# Altium integrated library Karta Radiowa.IntLib: 43 symbols (part 1 of 2)
Pins are listed as number, name and electrical type; pins without a type are passive.

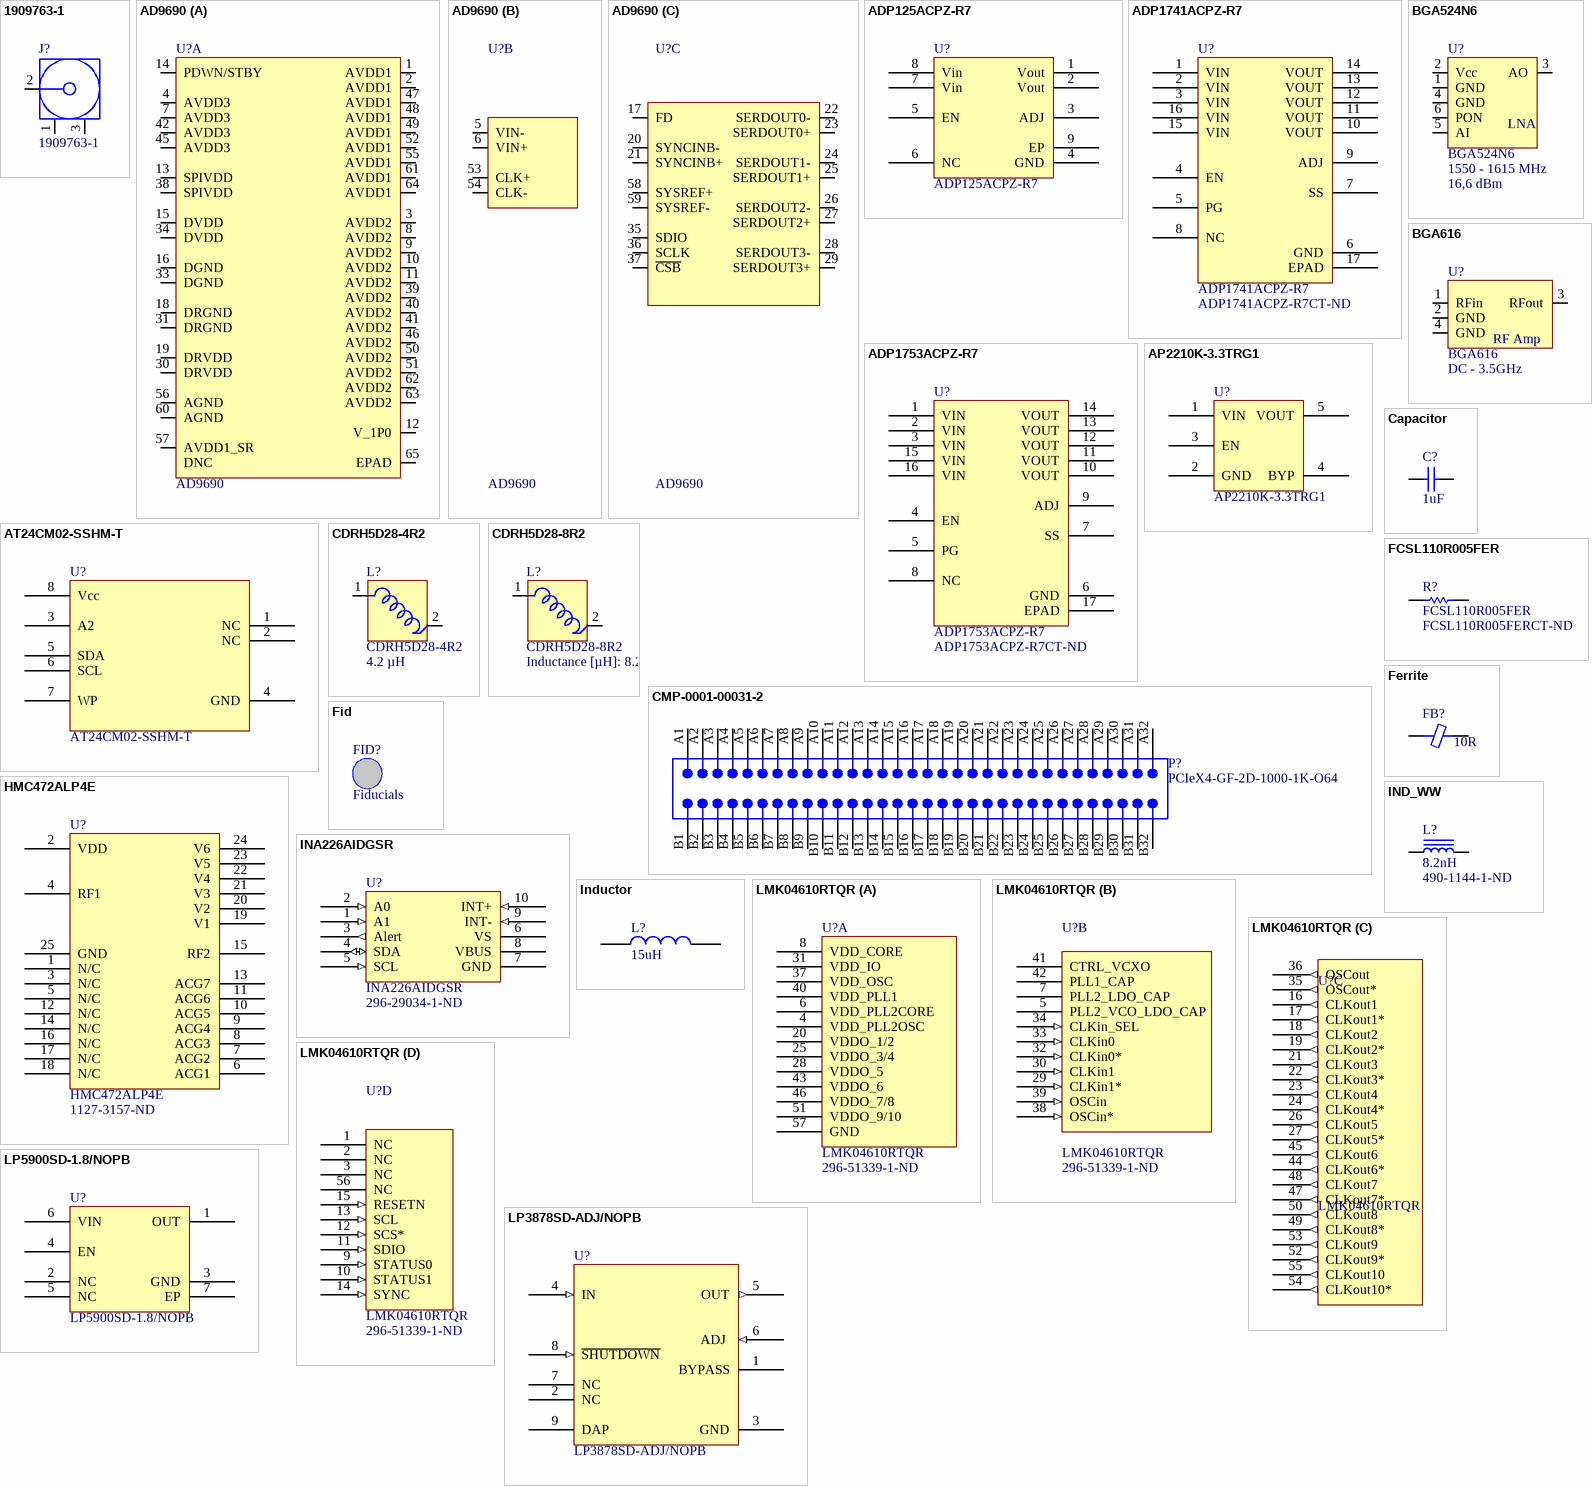
[diagram p0: symbols 1909763-1 to LP5900SD-1.8/NOPB]

## 1909763-1
designator J?
Ultra Miniature Coaxial Connector Jack, 60 V, 50 Ohm, -40 to 90 degC, RoHS, Tape and Reel; Brand: TE Connectivity / AMP; Maximum Frequency: 6 GHz; Gender: Jack (Female); Body Material: Liquid Crystal Polymer (LCP); RF Series: UMCC; Impedance: 50 Ohms; DatasheetVersion: Rev. B2; PackageReference: SMD; PackageDescription: 3-Pin Surface Mount Device, Body 2.6 x 2.6 mm; Supplier 1: Newark; Supplier Part Number 1: 62X0488; Supplier 2: Farnell; Supplier Part Number 2: 2781689; Supplier 3: Digi-Key; Supplier Part Number 3: A118077TR-ND; Supplier 4: Digi-Key; Supplier Part Number 4: A118077CT-ND; Supplier 5: Digi-Key; Supplier Part Number 5: A118077DKR-ND; Product Category: RF Connectors / Coaxial Connectors; Packaging: Reel; Product: Connectors; Orientation: Straight; Operating Temperature Range: - 40 C to + 90 C; Factory Pack Quantity: 5000; RoHS: Details; Contact Plating: Gold; Contact Material: Copper Alloy; Mounting Technology: Surface Mount; ComponentLink1Description: Manufacturer URL; ComponentLink1URL: http://www.te.com; ComponentLink2Description: Datasheet; ComponentLink2URL: http://www.te.com/commerce/DocumentDelivery/DDEController?Action=srchrtrv&DocNm=1909763&DocType=Customer+Drawing&DocLang=English
footprint TECO-1909763-1_V (SMD, 3-Leads, Body 2.6x2.6mm, Height 1.25mm)
pins: 1, 2, 3

## AD9690
designator U?
Manufacturer: Analog Devices; Manufacturer Part Number: AD9690BCPZ-500; Number of Bits: 14; Sampling Rate: 500MS/s; Number of Inputs: 1; Min Supply Voltage: 3.2V; Max Supply Voltage: 3.4V; Interface: Serial; Resolution: 14b; Supply Type: Single; Differential Nonlinearity: 0.5LSB; Integral Nonlinearity (INL): 2.5LSB; Power Dissipation: 1.5W; Supplier 1: Digi-Key; Supplier Part Number 1: AD9690BCPZ-500-ND; Stock 1: 6; Pricing 1: 1 = 199,64000, 10 = 191,20500, 25 = 186,98720 (USD); RoHS: Yes; Mount: Surface Mount; Number of Pins: 64; Min Operating Temperature: -40°C; Max Operating Temperature: 85°C; Packaging: Tray; Number of A/D Converters: 1; REACH SVHC: No SVHC; Lead Free: Lead Free; ComponentLink1URL: http://www.mouser.com/ds/2/609/AD9690-534148.pdf?src-supplier=Mouser; ComponentLink1Description: http://www.mouser.com/ds/2/609/AD9690-534148.pdf?src-supplier=Mouser; ComponentLink2URL: http://www.analog.com/media/en/technical-documentation/data-sheets/AD9690.pdf?src-supplier=Digi-Key; ComponentLink2Description: http://www.analog.com/media/en/technical-documentation/data-sheets/AD9690.pdf?src-supplier=Digi-Key; ComponentLink3URL: http://www.farnell.com/datasheets/2146909.pdf?src-supplier=Element14; ComponentLink3Description: http://www.farnell.com/datasheets/2146909.pdf?src-supplier=Element14; ComponentLink4URL: http://www.analog.com/media/en/technical-documentation/data-sheets/AD9690.pdf?src-supplier=Avnet; ComponentLink4Description: http://www.analog.com/media/en/technical-documentation/data-sheets/AD9690.pdf?src-supplier=Avnet
footprint AD9690 (AD9690 9 x 9mm, 64 pin, 0.5 pitch 7.6sq Pad)
part A pins: 1 AVDD1, 2 AVDD1, 3 AVDD2, 4 AVDD3, 7 AVDD3, 8 AVDD2, 9 AVDD2, 10 AVDD2, 11 AVDD2, 12 V_1P0, 13 SPIVDD, 14 PDWN/STBY, 15 DVDD, 16 DGND, 18 DRGND, 19 DRVDD, 30 DRVDD, 31 DRGND, 33 DGND, 34 DVDD, 38 SPIVDD, 39 AVDD2, 40 AVDD2, 41 AVDD2, 42 AVDD3, 44, 43, 32 DNC, 45 AVDD3, 46 AVDD2, 47 AVDD1, 48 AVDD1, 49 AVDD1, 50 AVDD2, 51 AVDD2, 52 AVDD1, 55 AVDD1, 56 AGND, 57 AVDD1_SR, 60 AGND, 61 AVDD1, 62 AVDD2, 63 AVDD2, 64 AVDD1, 65 EPAD
part B pins: 5 VIN-, 6 VIN+, 53 CLK+, 54 CLK-
part C pins: 17 FD, 20 SYNCINB-, 21 SYNCINB+, 22 SERDOUT0-, 23 SERDOUT0+, 24 SERDOUT1-, 25 SERDOUT1+, 26 SERDOUT2-, 27 SERDOUT2+, 28 SERDOUT3-, 29 SERDOUT3+, 35 SDIO, 36 SCLK, 37 ~{CSB}, 58 SYSREF+, 59 SYSREF-

## ADP125ACPZ-R7
designator U?
IC REG LIN POS ADJ 500MA 8LFCSP; Manufacturer: Analog Devices; Output Voltage: 5V; Number of Outputs: 1; Dropout Voltage: 130mV; Max Input Voltage: 5.5V; Min Input Voltage: 2.3V; Min Current Limit: 550mA; Polarity: Positive; Quiescent Current: 45uA; Reference Voltage: 500mV; Min Output Voltage: 800mV; Accuracy: 1%; Power Supply Rejection Ratio (PSRR): 60dB; Max Supply Current: 210uA; Output Type: Adjustable; Supplier 1: Farnell; Manufacturer Part Number: ADP125ACPZ-R7; Stock 1: 261; RoHS: Yes; Case/Package: MSOP; Number of Pins: 8; Contact Plating: Gold; Min Operating Temperature: -40°C; Max Operating Temperature: 125°C; Output Current: 500mA; Max Output Current: 500mA; Packaging: Tape and Reel; Number of Regulators: 1; Max Output Voltage: 5V; Nominal Supply Current: 45uA; Operating Supply Current: 45uA; Length: 2mm; Height: 0.6mm; Width: 2mm; REACH SVHC: No SVHC; Lead Free: Contains Lead; ComponentLink1URL: https://datasheet.ciiva.com/17365/adp124-125-17365589.pdf?src-supplier=Avnet+Europe; ComponentLink1Description: https://datasheet.ciiva.com/17365/adp124-125-17365589.pdf?src-supplier=Avnet+Europe; ComponentLink2URL: https://datasheet.ciiva.com/2056/adp124-125-2056955.pdf?src-supplier=Digi-Key; ComponentLink2Description: https://datasheet.ciiva.com/2056/adp124-125-2056955.pdf?src-supplier=Digi-Key; ComponentLink3URL: https://datasheet.ciiva.com/2056/adp124-125-2056954.pdf?src-supplier=Digi-Key; ComponentLink3Description: https://datasheet.ciiva.com/2056/adp124-125-2056954.pdf?src-supplier=Digi-Key; ComponentLink4URL: https://datasheet.ciiva.com/2056/adp124-125-2056956.pdf?src-supplier=Digi-Key; ComponentLink4Description: https://datasheet.ciiva.com/2056/adp124-125-2056956.pdf?src-supplier=Digi-Key; ComponentLink5URL: https://datasheet.ciiva.com/48694/001251247-da-01-en-ic-reg-l-adj-adp125acpz-r7-lfcspud-8-adi-48694599.pdf?src-supplier=Conrad; ComponentLink5Description: https://datasheet.ciiva.com/48694/001251247-da-01-en-ic-reg-l-adj-adp125acpz-r7-lfcspud-8-adi-48694599.pdf?src-supplier=Conrad; Supplier Part Number 1: 2457144; Supplier 2: Digi-Key; Manufacturer 2: Analog Devices; Manufacturer Part Number 2: ADP125ACPZ-R7; Stock 2: 12322; Pricing 2: 1=1.39000, 10=1.23900, 25=1.17600, 100=0.96600, 250=0.90300, 500=0.79800, 1000=0.63000 (USD); ComponentLink6URL: http://datasheet.octopart.com/ADP125ACPZ-R7-Analog-Devices-datasheet-11525030.pdf?src-supplier=Newark; ComponentLink6Description: http://datasheet.octopart.com/ADP125ACPZ-R7-Analog-Devices-datasheet-11525030.pdf?src-supplier=Newark; ComponentLink7URL: http://datasheet.octopart.com/ADP125ACPZ-R7-Analog-Devices-datasheet-38878834.pdf?src-supplier=Newark; ComponentLink7Description: http://datasheet.octopart.com/ADP125ACPZ-R7-Analog-Devices-datasheet-38878834.pdf?src-supplier=Newark; ComponentLink8URL: http://datasheet.octopart.com/ADP125ACPZ-R7-Analog-Devices-datasheet-10623001.pdf?src-supplier=Analog+Devices; ComponentLink8Description: http://datasheet.octopart.com/ADP125ACPZ-R7-Analog-Devices-datasheet-10623001.pdf?src-supplier=Analog+Devices; ComponentLink9URL: http://datasheet.octopart.com/ADP125ACPZ-R7-Analog-Devices-datasheet-8638579.pdf?src-supplier=Analog+Devices; ComponentLink9Description: http://datasheet.octopart.com/ADP125ACPZ-R7-Analog-Devices-datasheet-8638579.pdf?src-supplier=Analog+Devices; ComponentLink10URL: http://datasheet.octopart.com/ADP125ACPZ-R7-Analog-Devices-datasheet-11776558.pdf?src-supplier=Arrow; ComponentLink10Description: http://datasheet.octopart.com/ADP125ACPZ-R7-Analog-Devices-datasheet-11776558.pdf?src-supplier=Arrow; Supplier Part Number 2: ADP125ACPZ-R7CT-ND
footprint ADP124_125 (8-Lead Lead Frame Chip Scale Package [LFCSP_UD]  2 mm × 2 mm Body, Ultra Thin, Dual Lead  (CP-8-10))
pins: 1 Vout, 2 Vout, 3 ADJ, 4 GND, 5 EN, 6 NC, 7 Vin, 8 Vin, 9 EP "To GND"

## ADP1741ACPZ-R7
designator U?  Supplier Part Number 1: ADP1741ACPZ-R7CT-ND
IC REG LIN POS ADJ 2A 16LFCSP; Manufacturer: Analog Devices; Output Voltage: 3V; Max Input Voltage: 3.6V; Min Input Voltage: 1.6V; Min Output Voltage: 750mV; Operating Supply Current: 1.8mA; Power Supply Rejection Ratio (PSRR): 70dB; Dropout Voltage: 160mV; Number of Outputs: 1; Min Current Limit: 2.4A; Polarity: Positive; Accuracy: 1%; Output Type: Adjustable; Supplier 1: Digi-Key; Manufacturer Part Number: ADP1741ACPZ-R7; Stock 1: 7057; Pricing 1: 1 = 3,42000, 10 = 3,07000, 25 = 2,90240, 100 = 2,51540, 250 = 2,38644, 500 = 2,14136 (USD); RoHS: Yes; Case/Package: LFCSP EP; Number of Pins: 16; Min Operating Temperature: -40°C; Max Operating Temperature: 125°C; Output Current: 2A; Max Output Current: 2A; Packaging: Tape and Reel; Max Output Voltage: 3V; Max Supply Current: 1.8mA; Number of Regulators: 1; Output Voltage Accuracy: 1%; Radiation Hardening: No; REACH SVHC: No SVHC; Lead Free: Contains Lead; ComponentLink1URL: https://datasheet.ciiva.com/2041/adp1740-1741-2041344.pdf?src-supplier=Digi-Key; ComponentLink1Description: https://datasheet.ciiva.com/2041/adp1740-1741-2041344.pdf?src-supplier=Digi-Key; ComponentLink2URL: https://datasheet.ciiva.com/15364/adp1740-1741-259394-15364336.pdf?src-supplier=Mouser; ComponentLink2Description: https://datasheet.ciiva.com/15364/adp1740-1741-259394-15364336.pdf?src-supplier=Mouser; ComponentLink3URL: https://datasheet.ciiva.com/23604/697190-23604608.pdf?src-supplier=Newark; ComponentLink3Description: https://datasheet.ciiva.com/23604/697190-23604608.pdf?src-supplier=Newark; ComponentLink4URL: https://datasheet.ciiva.com/2041/adp1740-1741-2041345.pdf?src-supplier=Digi-Key; ComponentLink4Description: https://datasheet.ciiva.com/2041/adp1740-1741-2041345.pdf?src-supplier=Digi-Key; ComponentLink5URL: https://datasheet.ciiva.com/3224/adp1740-1741-3224694.pdf?src-supplier=Avnet; ComponentLink5Description: https://datasheet.ciiva.com/3224/adp1740-1741-3224694.pdf?src-supplier=Avnet; ComponentLink6URL: https://datasheet.ciiva.com/17365/adp1740-1741-17365261.pdf?src-supplier=Avnet+Europe; ComponentLink6Description: https://datasheet.ciiva.com/17365/adp1740-1741-17365261.pdf?src-supplier=Avnet+Europe; ComponentLink7URL: https://datasheet.ciiva.com/2041/adp1740-1741-2041343.pdf?src-supplier=Digi-Key; ComponentLink7Description: https://datasheet.ciiva.com/2041/adp1740-1741-2041343.pdf?src-supplier=Digi-Key
footprint ADP1752_1753/ADP1740_1741 (16-Lead Lead Frame Chip Scale Package [LFCSP_WQ]  4 mm × 4 mm Body, Very Very Thin Quad  (CP-16-23))
pins: 1 VIN, 2 VIN, 3 VIN, 4 EN, 5 PG, 6 GND, 7 SS, 8 NC, 9 ADJ, 10 VOUT, 11 VOUT, 12 VOUT, 13 VOUT, 14 VOUT, 15 VIN, 16 VIN, 17 EPAD

## ADP1753ACPZ-R7
designator U?  Supplier Part Number 1: ADP1753ACPZ-R7CT-ND
IC REG LIN POS ADJ 800MA 16LFCSP; Manufacturer: Analog Devices; Number of Outputs: 1; Output Voltage: 3V; Dropout Voltage: 70mV; Max Input Voltage: 3.6V; Min Input Voltage: 1.6V; Min Current Limit: 1A; Polarity: Positive; Accuracy: 2%; Min Output Voltage: 750mV; Power Supply Rejection Ratio (PSRR): 65dB; Nominal Supply Current: 1.4mA; Output Type: Adjustable; Supplier 1: Digi-Key; Manufacturer Part Number: ADP1753ACPZ-R7; Stock 1: 1570; Pricing 1: 1 = 2,85000, 10 = 2,56400, 25 = 2,41880, 100 = 2,06070, 250 = 1,93496, 500 = 1,69308 (USD); RoHS: Yes; Case/Package: LFCSP EP; Number of Pins: 16; Min Operating Temperature: -40°C; Max Operating Temperature: 125°C; Output Current: 800mA; Max Output Current: 800mA; Packaging: Tape and Reel; Number of Regulators: 1; Max Output Voltage: 3V; Operating Supply Current: 1.4mA; Max Supply Current: 1.4mA; Length: 4mm; Height: 0.83mm; Width: 4mm; Radiation Hardening: No; REACH SVHC: No SVHC; Lead Free: Contains Lead; ComponentLink1URL: https://datasheet.ciiva.com/26908/adp1753acpz-r7-26908167.pdf?src-supplier=IIIC; ComponentLink1Description: https://datasheet.ciiva.com/26908/adp1753acpz-r7-26908167.pdf?src-supplier=IIIC; ComponentLink2URL: https://datasheet.ciiva.com/8241/adp1752-1753-8241910.pdf?src-supplier=Avnet; ComponentLink2Description: https://datasheet.ciiva.com/8241/adp1752-1753-8241910.pdf?src-supplier=Avnet; ComponentLink3URL: https://datasheet.ciiva.com/2041/adp1752-1753-2041241.pdf?src-supplier=Digi-Key; ComponentLink3Description: https://datasheet.ciiva.com/2041/adp1752-1753-2041241.pdf?src-supplier=Digi-Key; ComponentLink4URL: https://datasheet.ciiva.com/2041/adp1752-1753-2041242.pdf?src-supplier=Digi-Key; ComponentLink4Description: https://datasheet.ciiva.com/2041/adp1752-1753-2041242.pdf?src-supplier=Digi-Key; ComponentLink5URL: https://datasheet.ciiva.com/2041/adp1752-1753-2041243.pdf?src-supplier=Digi-Key; ComponentLink5Description: https://datasheet.ciiva.com/2041/adp1752-1753-2041243.pdf?src-supplier=Digi-Key; ComponentLink6URL: https://datasheet.ciiva.com/17365/adp1752-1753-17365277.pdf?src-supplier=Avnet+Europe; ComponentLink6Description: https://datasheet.ciiva.com/17365/adp1752-1753-17365277.pdf?src-supplier=Avnet+Europe
footprint ADP1752_1753/ADP1740_1741 (16-Lead Lead Frame Chip Scale Package [LFCSP_WQ]  4 mm × 4 mm Body, Very Very Thin Quad  (CP-16-23))
pins: 1 VIN, 2 VIN, 3 VIN, 4 EN, 5 PG, 6 GND, 7 SS, 8 NC, 9 ADJ, 10 VOUT, 11 VOUT, 12 VOUT, 13 VOUT, 14 VOUT, 15 VIN, 16 VIN, 17 EPAD

## AP2210K-3.3TRG1
designator U?
IC REG LINEAR 3.3V 300MA SOT23-5; Manufacturer 1: Diodes; Dropout Voltage: 250mV; Number of Outputs: 1; Min Input Voltage: 2.5V; Max Input Voltage: 13.2V; Quiescent Current: 150uA; Polarity: Positive; Accuracy: 1%; Power Supply Rejection Ratio (PSRR): 75dB; Output Type: Fixed; Supplier 1: Digi-Key; Manufacturer Part Number 1: AP2210K-3.3TRG1; Stock 1: 89118; Pricing 1: 1=0.42000, 10=0.31700, 100=0.19730, 500=0.13496, 1000=0.10382 (USD); RoHS: Yes; Mount: Surface Mount; Case/Package: SOT-23-5; Number of Pins: 5; Weight: 0.001058oz; Min Operating Temperature: -40°C; Max Operating Temperature: 125°C; Package Quantity: 1; Packaging: Tape and Reel; Max Output Current: 300mA; Output Voltage: 3.3V; Output Current: 300mA; Number of Regulators: 1; Length: 3.02mm; Height: 1.3mm; Width: 1.7mm; Radiation Hardening: No; Lead Free: Lead Free; ComponentLink1URL: http://www.mouser.com/ds/2/115/AP2210-271459.pdf?src-supplier=Mouser; ComponentLink1Description: http://www.mouser.com/ds/2/115/AP2210-271459.pdf?src-supplier=Mouser; ComponentLink2URL: http://www.alliedelec.com/m/d/24500b427815944890653ed70b5a0b32.pdf?src-supplier=Allied+Electronics; ComponentLink2Description: http://www.alliedelec.com/m/d/24500b427815944890653ed70b5a0b32.pdf?src-supplier=Allied+Electronics; ComponentLink3URL: https://www.diodes.com/assets/Datasheets/AP2210.pdf?src-supplier=Digi-Key; ComponentLink3Description: https://www.diodes.com/assets/Datasheets/AP2210.pdf?src-supplier=Digi-Key; ComponentLink4URL: http://www.diodes.com/datasheets/AP2210.pdf?src-supplier=Avnet; ComponentLink4Description: http://www.diodes.com/datasheets/AP2210.pdf?src-supplier=Avnet; Supplier Part Number 1: AP2210K-3.3TRG1DICT-ND
footprint AP2210K-3.3TRG1 (SOT23, 5-Leads, Body 2.96x2.83mm, Pitch 0.95mm, IPC High Density)
pins: 1 VIN, 2 GND, 3 EN, 4 BYP, 5 VOUT

## AT24CM02-SSHM-T
designator U?
1.7-5.5V 1MHZ IND TMP 8-SOIC-N; Manufacturer: Microchip; Supplier 1: Digi-Key; Manufacturer Part Number: AT24CM02-SSHM-T; Stock 1: 24235; Pricing 1: 1 = 2,51000, 25 = 2,42040, 100 = 2,41540 (USD); RoHS: No; ComponentLink1URL: http://www.microchip.com/mymicrochip/filehandler.aspx?ddocname=en589710&src-supplier=Digi-Key; ComponentLink1Description: http://www.microchip.com/mymicrochip/filehandler.aspx?ddocname=en589710&src-supplier=Digi-Key; Supplier Part Number 1: AT24CM02-SSHM-TCT-ND
footprint AT24CM02
pins: 1 NC, 2 NC, 3 A2, 4 GND, 5 SDA, 6 SCL, 7 WP, 8 Vcc

## BGA524N6
designator U?  Operating Frequency: 1550 - 1615 MHz  Gain: 16,6 dBm
Part Number: BGA524N6; URL: https://www.infineon.com/dgdl/Infineon-BGA524N6-DS-v03_00-en.pdf?fileId=db3a304344e406b50144e44dfad302b9; Supplier 1: Digi-Key; Supplier Part Number 1: BGA524N6E6327XTSA1DKR-ND
footprint TSNP-6-10-FP (TSNP-6-10-FP, SOTFL, 6-Leads, Body 1,10x0,80mm, Pitch 0,40mm, IPC Medium Density)
pins: 1 GND, 2 Vcc, 3 AO, 4 GND, 5 AI, 6 PON
text: LNA

## BGA616
designator U?  Frequency: DC - 3.5GHz
Supplier 1: Digi-Key; Supplier Part Number 1: BGA616H6327XTSA1CT-ND
footprint GPS05605 (SOT343, 4-Leads, Body 2,00x2,15mm, Pitch 1,30mm, IPC High Density)
pins: 1 RFin, 2 GND, 3 RFout, 4 GND
text: RF Amp

## Capacitor
designator C?, comment 1uF
Manufacturer 1: Samsung; Manufacturer Part Number 1: CL10A105KA8NNNC; Material: Ceramic; Tolerance: 10%; Dielectric: X5R; Voltage: 25V; Supplier 1: Digi-Key; Supplier Part Number 1: 1276-1102-1-ND; Stock 1: 3421596; Pricing 1: 1=0.10000, 10=0.04100, 100=0.01850, 500=0.01320, 1000=0.01037 (USD); RoHS: Yes; Mount: Surface Mount; Case/Package: 0603; Case Code (Metric): 1608; Case Code (Imperial): 0603; Contact Plating: Tin; Min Operating Temperature: -55°C; Max Operating Temperature: 85°C; Capacitance: 1uF; Voltage Rating (DC): 25V; Packaging: Tape and Reel; Package Quantity: 1; Voltage Rating: 25V; Length: 1.6mm; Height: 0.8mm; Depth: 0.8mm; Width: 0.031inch; Thickness: 0.035inch; Radiation Hardening: No; Lead Free: Lead Free; ComponentLink1URL: https://datasheet.ciiva.com/25801/cl10a105ka8nnnc-25801364.pdf?src-supplier=Digi-Key; ComponentLink1Description: https://datasheet.ciiva.com/25801/cl10a105ka8nnnc-25801364.pdf?src-supplier=Digi-Key; ComponentLink2URL: https://datasheet.ciiva.com/26838/getdatasheetpartid-357530-26838332.pdf?src-supplier=Verical; ComponentLink2Description: https://datasheet.ciiva.com/26838/getdatasheetpartid-357530-26838332.pdf?src-supplier=Verical; ComponentLink3URL: https://datasheet.ciiva.com/29198/458162-da-01-en-vs-kondensator-0603-29198475.pdf?src-supplier=Conrad; ComponentLink3Description: https://datasheet.ciiva.com/29198/458162-da-01-en-vs-kondensator-0603-29198475.pdf?src-supplier=Conrad
footprint CAP 0201/0603 (Chip Capacitor, 2-Leads, Body 0.60x0.30mm, IPC Medium Density)
footprint CAP 0201/0603 RF (Chip Capacitor, 2-Leads, Body 0.60x0.30mm, IPC High Density)
footprint CAP 0402/1005 (Chip Capacitor, 2-Leads, Body 1.02x0.51mm, IPC Medium Density)
footprint CAP 0402/1005 RF (Chip Capacitor, 2-Leads, Body 1.02x0.51mm, IPC High Density)
footprint CAP 0603/1608 (Chip Capacitor, 2-Leads, Body 1.60x0.80mm, IPC Medium Density)
footprint CAP 0603/1608 RF (Chip Capacitor, 2-Leads, Body 1.60x0.80mm, IPC High Density)
footprint CAP 0805/2012 (Chip Capacitor, 2-Leads, Body 2.00x1.20mm, IPC Medium Density)
footprint CAP 0805/2012 RF (Chip Capacitor, 2-Leads, Body 2.00x1.20mm, IPC High Density)
footprint CAP 1206/3216 (Chip Capacitor, 2-Leads, Body 3.25x1.60mm, IPC Medium Density)
pins: 1, 2

## CDRH5D28-4R2
designator L?  Inductance: 4.2 µH
Supplier 1: Digi-Key; Supplier Part Number 1: 308-2193-1-ND
footprint CDRH5D28 (CDRH5D28 , Precision Wire Wound Inductor, 2-Leads, Body 6,00x6,00mm, IPC High Density)
pins: 1, 2

## CDRH5D28-8R2
designator L?  Inductance [µH]: 8.2
Part Number: CDRH5D28NP-8R2; Supplier Part Number 2: 308-2309-6-ND; Supplier 2: Digi-Key
footprint CDRH5D28 (CDRH5D28 , Precision Wire Wound Inductor, 2-Leads, Body 6,00x6,00mm, IPC High Density)
pins: 1, 2

## CMP-0001-00031-2
designator P?, comment PCIeX4-GF-2D-1000-1K-O64  (no BOM)
Golden finger, PCIeX4, Dual, Opposite, Pitch 1mm, 64-Position; Mating Connector: Molex-87715-9106; Datasheet Version: rev2.0, Apr-2007; Package Reference: PCIeX4-GF-2D-1000-1K-O64; ClassName: Edge Connector; Publisher: Altium
footprint PCIeX4-GF-2D-1000-1K-O64 (Golden finger, PCIeX4, Dual, Opposite, Pitch 1mm, 64-Position)
pins: A1, A2, A3, A4, A5, A6, A7, A8, A9, A10, A11, A12, A13, A14, A15, A16, A17, A18, A19, A20, A21, A22, A23, A24, A25, A26, A27, A28, A29, A30, A31, A32, B1, B2, B3, B4, B5, B6, B7, B8, B9, B10, B11, B12, B13, B14, B15, B16, B17, B18, B19, B20, B21, B22, B23, B24, B25, B26, B27, B28, B29, B30, B31, B32

## FCSL110R005FER
designator R?  Supplier Part Number 1: FCSL110R005FERCT-ND
RES SMD 5 MOHM 5W 4320 WIDE; Manufacturer: Ohmite; Tolerance: 1%; Resistance: 5mR; Temperature Coefficient: 50ppm/°C; Supplier 1: Digi-Key; Manufacturer Part Number: FCSL110R005FER; Stock 1: 3877; Pricing 1: 1 = 2,79000, 10 = 2,47700, 25 = 2,29720, 50 = 2,16220, 100 = 1,89190, 250 = 1,62164, 500 = 1,35136 (USD); RoHS: Yes; Case/Package: Metal; Number of Pins: 2; Min Operating Temperature: -55°C; Max Operating Temperature: 155°C; Packaging: Tape and Reel; Package Quantity: 1; Max Power Dissipation: 5W; Features: Moisture Resistant; Power Rating: 5W; Termination: SMD/SMT; Composition: Metal Foil; Number of Terminations: 2; Length: 0.197inch; Height: 0.028inch; Width: 11mm; Depth: 5mm; REACH SVHC: Unknown; ComponentLink1URL: https://datasheet.ciiva.com/2484/res-fcsl-2484643.pdf?src-supplier=Digi-Key; ComponentLink1Description: https://datasheet.ciiva.com/2484/res-fcsl-2484643.pdf?src-supplier=Digi-Key; ComponentLink2URL: https://datasheet.ciiva.com/2484/res-fcsl-2484644.pdf?src-supplier=Digi-Key; ComponentLink2Description: https://datasheet.ciiva.com/2484/res-fcsl-2484644.pdf?src-supplier=Digi-Key; ComponentLink3URL: https://datasheet.ciiva.com/2484/res-fcsl-2484645.pdf?src-supplier=Digi-Key; ComponentLink3Description: https://datasheet.ciiva.com/2484/res-fcsl-2484645.pdf?src-supplier=Digi-Key; ComponentLink4URL: https://datasheet.ciiva.com/6181/fcsl-6181333.pdf?src-supplier=Farnell; ComponentLink4Description: https://datasheet.ciiva.com/6181/fcsl-6181333.pdf?src-supplier=Farnell; ComponentLink5URL: https://datasheet.ciiva.com/46422/1812595-46422917.pdf?src-supplier=Element14; ComponentLink5Description: https://datasheet.ciiva.com/46422/1812595-46422917.pdf?src-supplier=Element14; ComponentLink6URL: https://datasheet.ciiva.com/8080/fcsl-8080343.pdf?src-supplier=Element14; ComponentLink6Description: https://datasheet.ciiva.com/8080/fcsl-8080343.pdf?src-supplier=Element14
footprint FCSL110R005FERCT-ND (Wide 4320 (11050 Metric), 2043)
pins: 1, 2

## Ferrite
designator FB?, comment 10R
Manufacturer 1: Murata; Manufacturer Part Number 1: BLM15AX100SN1D; Material: Ferrite,Steel; Tolerance: 25%; Current Rating: 1.74A; Number of Lines: 1; DC Resistance (DCR): 15mR; Test Frequency: 100MHz; Supplier 1: Digi-Key; Supplier Part Number 1: 490-5437-1-ND; Stock 1: 154406; Pricing 1: 1=0.11000, 10=0.09000, 25=0.08120, 50=0.05960, 100=0.05140, 250=0.04060, 500=0.03428, 1000=0.02886, 5000=0.02571 (USD); RoHS: Yes; Case/Package: 0402; Number of Pins: 2; Case Code (Metric): 1005; Case Code (Imperial): 0402; Min Operating Temperature: -55°C; Max Operating Temperature: 125°C; Package Quantity: 1; Packaging: Tape and Reel; Impedance: 10R; Max Current Rating: 1.74A; Max DC Current: 1.74A; Termination: SMD/SMT; Number of Circuits: 1; Length: 1mm; Height: 0.5mm; Width: 0.5mm; Depth: 0.5mm; REACH SVHC: No SVHC; Lead Free: Lead Free; ComponentLink1URL: https://datasheet.ciiva.com/41449/001172165-da-01-en-drossel-0402-10r0-1-0x0-5mm-10000st-41449453.pdf?src-supplier=Conrad; ComponentLink1Description: https://datasheet.ciiva.com/41449/001172165-da-01-en-drossel-0402-10r0-1-0x0-5mm-10000st-41449453.pdf?src-supplier=Conrad; ComponentLink2URL: https://datasheet.ciiva.com/1012/l0110e-1012384.pdf?src-supplier=Digi-Key; ComponentLink2Description: https://datasheet.ciiva.com/1012/l0110e-1012384.pdf?src-supplier=Digi-Key; ComponentLink3URL: https://datasheet.ciiva.com/1012/l0110e-1012385.pdf?src-supplier=Digi-Key; ComponentLink3Description: https://datasheet.ciiva.com/1012/l0110e-1012385.pdf?src-supplier=Digi-Key; ComponentLink4URL: https://datasheet.ciiva.com/1012/l0110e-1012383.pdf?src-supplier=Digi-Key; ComponentLink4Description: https://datasheet.ciiva.com/1012/l0110e-1012383.pdf?src-supplier=Digi-Key
footprint FB1206 (Chip Inductor, 2-Leads, Body 3,20x1,60mm, IPC High Density)
footprint FER 0201/0603 (Chip Inductor, 2-Leads, Body 0.60x0.30mm, IPC Medium Density)
footprint FER 0402/1005 (Chip Ferrite, 2-Leads, Body 1.02x0.51mm, IPC Medium Density)
footprint FER 0603/1608 (Chip Ferrite, 2-Leads, Body 1.60x0.80mm, IPC Medium Density)
footprint FER 0805/2012 (Chip Ferrite, 2-Leads, Body 2.00x1.20mm, IPC Medium Density)
pins: 1, 2

## Fid
designator FID?, comment Fiducials
footprint Fiducials

## HMC472ALP4E
designator U?  Supplier Part Number 1: 1127-3157-ND
ANALOG DEVICES   HMC472ALP4E   RF ATTENUATOR, 3.8GHZ, 5.5V, HQFN-24; Min Supply Voltage: 4.5V; Attenuation Value: 31.5dB; Impedance: 50R; Max Power Dissipation: 560mW; Number of Bits: 6; Number of Channels: 1; Insertion Loss: 3dB; Operating Supply Voltage: 5V; Supplier 1: Digi-Key; Manufacturer: Analog Devices; Manufacturer Part Number: HMC472ALP4E; Stock 1: 867; Pricing 1: 1 = 7,47000, 10 = 6,84400, 25 = 6,22160, 100 = 5,59940, 250 = 5,13284, 500 = 4,66620, 1000 = 4,19958 (USD); RoHS: Yes; Mount: Surface Mount; Case/Package: SMD/SMT; Number of Pins: 24; Contact Plating: Tin,Matte; Min Operating Temperature: -40°C; Max Operating Temperature: 85°C; Max Supply Voltage: 5.5V; Packaging: Cut Tape; Max Frequency: 3.8GHz; Package Quantity: 50; Min Input Voltage: 4.5V; Max Input Voltage: 5.5V; REACH SVHC: No SVHC; Lead Free: Contains Lead; ComponentLink1URL: http://www.mouser.com/ds/2/609/hmc472a-879296.pdf?src-supplier=Mouser; ComponentLink1Description: http://www.mouser.com/ds/2/609/hmc472a-879296.pdf?src-supplier=Mouser; ComponentLink2URL: http://www.analog.com/media/en/technical-documentation/data-sheets/hmc472a.pdf?src-supplier=Avnet+Asia; ComponentLink2Description: http://www.analog.com/media/en/technical-documentation/data-sheets/hmc472a.pdf?src-supplier=Avnet+Asia; ComponentLink3URL: http://www.farnell.com/datasheets/1868224.pdf?src-supplier=Element14; ComponentLink3Description: http://www.farnell.com/datasheets/1868224.pdf?src-supplier=Element14; ComponentLink4URL: https://www.hittite.com/content/documents/data_sheet/hmc472alp4.pdf?src-supplier=Avnet; ComponentLink4Description: https://www.hittite.com/content/documents/data_sheet/hmc472alp4.pdf?src-supplier=Avnet; ComponentLink5URL: https://www.analog.com/media/en/technical-documentation/data-sheets/hmc472a.pdf?src-supplier=Digi-Key; ComponentLink5Description: https://www.analog.com/media/en/technical-documentation/data-sheets/hmc472a.pdf?src-supplier=Digi-Key
footprint HMC472ALP4E (24-VFQFN Exposed Pad)
pins: 1 N/C, 2 VDD, 3 N/C, 4 RF1, 5 N/C, 6 ACG1, 7 ACG2, 8 ACG3, 9 ACG4, 10 ACG5, 11 ACG6, 12 N/C, 13 ACG7, 14 N/C, 15 RF2, 16 N/C, 17 N/C, 18 N/C, 19 V1, 20 V2, 21 V3, 22 V4, 23 V5, 24 V6, 25 GND

## INA226AIDGSR
designator U?  Supplier Part Number 1: 296-29034-1-ND
IC MONITOR PWR/CURR BIDIR 10MSOP; Manufacturer: Texas Instruments; Min Supply Voltage: 2.7V; Max Supply Voltage: 5.5V; Nominal Supply Current: 330uA; Common Mode Rejection Ratio: 140dB; Output Current: 10mA; Input Bias Current: 10uA; Input Offset Voltage (Vos): 2.5uV; Accuracy: 0.02%; Supplier 1: Digi-Key; Manufacturer Part Number: INA226AIDGSR; Stock 1: 62024; Pricing 1: 1 = 2,88000, 10 = 2,58900, 100 = 2,12100, 500 = 1,80554, 1000 = 1,52275 (USD); RoHS: Yes; Mount: Surface Mount; Case/Package: VSSOP; Number of Pins: 10; Contact Plating: Gold; Min Operating Temperature: -40°C; Max Operating Temperature: 125°C; Packaging: Tape and Reel; Package Quantity: 1; Radiation Hardening: No; REACH SVHC: No SVHC; Lead Free: Lead Free; ComponentLink1URL: https://datasheet.ciiva.com/1939/ina226-1939633.pdf?src-supplier=Digi-Key; ComponentLink1Description: https://datasheet.ciiva.com/1939/ina226-1939633.pdf?src-supplier=Digi-Key; ComponentLink2URL: https://datasheet.ciiva.com/4875/sbos547-126280-4875559.pdf?src-supplier=Mouser; ComponentLink2Description: https://datasheet.ciiva.com/4875/sbos547-126280-4875559.pdf?src-supplier=Mouser; ComponentLink3URL: https://datasheet.ciiva.com/1939/ina226-1939634.pdf?src-supplier=Digi-Key; ComponentLink3Description: https://datasheet.ciiva.com/1939/ina226-1939634.pdf?src-supplier=Digi-Key; ComponentLink4URL: https://datasheet.ciiva.com/1939/ina226-1939635.pdf?src-supplier=Digi-Key; ComponentLink4Description: https://datasheet.ciiva.com/1939/ina226-1939635.pdf?src-supplier=Digi-Key; ComponentLink5URL: https://datasheet.ciiva.com/14196/ina226-14196741.pdf?src-supplier=Avnet; ComponentLink5Description: https://datasheet.ciiva.com/14196/ina226-14196741.pdf?src-supplier=Avnet; ComponentLink6URL: https://datasheet.ciiva.com/22693/1840205-22693516.pdf?src-supplier=Element14; ComponentLink6Description: https://datasheet.ciiva.com/22693/1840205-22693516.pdf?src-supplier=Element14
footprint INA226 (TSSOP, 10-Leads, Body 3,00x3,00mm, Pitch 0,50mm, IPC Medium Density)
pins: 1 A1 (in), 2 A0 (in), 3 Alert (out), 4 SDA (io), 5 SCL (in), 6 VS, 7 GND, 8 VBUS, 9 INT- (in), 10 INT+ (in)

## IND_WW
designator L?, comment 8.2nH  Supplier Part Number 1: 490-1144-1-ND
Manufacturer 1: Murata; Manufacturer Part Number 1: LQW15AN8N2J00D; Core Material: Air,Ferrite; Current Rating: 540mA; Tolerance: 5%; Shielding: Unshielded; Q Factor: 25; Self Resonant Frequency: 5.5GHz; DC Resistance (DCR): 140mR; Test Frequency: 100MHz; Supplier 1: Digi-Key; Stock 1: 37106; Pricing 1: 1=0.17000, 10=0.15500, 100=0.10350, 500=0.08626, 1000=0.07245, 2500=0.06210 (USD); RoHS: Yes; Mount: Surface Mount; Case/Package: 0402; Weight: 2.8E-05oz; Case Code (Metric): 1005; Case Code (Imperial): 0402; Min Operating Temperature: -55°C; Max Operating Temperature: 125°C; Package Quantity: 1; Packaging: Tape and Reel; Inductance: 8.2nH; Max DC Current: 540mA; Termination: SMD/SMT; DC Current: 540mA; Military Standard: Not; Length: 1mm; Height: 0.5mm; Width: 0.02inch; Depth: 0.7mm; Radiation Hardening: No; Lead Free: Lead Free; ComponentLink1URL: https://datasheet.ciiva.com/11799/0900766b8090d800-11799046.pdf?src-supplier=RSComponents; ComponentLink1Description: https://datasheet.ciiva.com/11799/0900766b8090d800-11799046.pdf?src-supplier=RSComponents; ComponentLink2URL: https://datasheet.ciiva.com/1042/l0075s0080lqw15a-00-1042176.pdf?src-supplier=Digi-Key; ComponentLink2Description: https://datasheet.ciiva.com/1042/l0075s0080lqw15a-00-1042176.pdf?src-supplier=Digi-Key; ComponentLink3URL: https://datasheet.ciiva.com/17278/l0075s0080lqw15a-00-17278345.pdf?src-supplier=Avnet+Europe; ComponentLink3Description: https://datasheet.ciiva.com/17278/l0075s0080lqw15a-00-17278345.pdf?src-supplier=Avnet+Europe; ComponentLink4URL: https://datasheet.ciiva.com/8506/l0075s0080lqw15a-00-8506028.pdf?src-supplier=Avnet; ComponentLink4Description: https://datasheet.ciiva.com/8506/l0075s0080lqw15a-00-8506028.pdf?src-supplier=Avnet; ComponentLink5URL: https://datasheet.ciiva.com/1042/l0075s0080lqw15a-00-1042174.pdf?src-supplier=Digi-Key; ComponentLink5Description: https://datasheet.ciiva.com/1042/l0075s0080lqw15a-00-1042174.pdf?src-supplier=Digi-Key; ComponentLink6URL: https://datasheet.ciiva.com/1042/l0075s0080lqw15a-00-1042175.pdf?src-supplier=Digi-Key; ComponentLink6Description: https://datasheet.ciiva.com/1042/l0075s0080lqw15a-00-1042175.pdf?src-supplier=Digi-Key
footprint IND 0402/1005 RF WW (Chip Inductor, 2-Leads, Body 1.00x0.50mm, IPC High Density)
pins: 1, 2

## Inductor
designator L?, comment 15uH
Manufacturer 1: TDK; Manufacturer Part Number 1: GLFR1608T150M-LR; Tolerance: 20%; Shielding: Shielded; Current Rating: 75mA; Max DC Current: 220mA; DC Resistance (DCR): 900mR; Supplier 1: Digi-Key; Supplier Part Number 1: 445-6151-1-ND; Stock 1: 4756; Pricing 1: 1=0.27000, 10=0.24400, 100=0.16760, 500=0.14324, 1000=0.10971 (USD); RoHS: Yes; Mount: Surface Mount; Case/Package: 0603; Case Code (Metric): 1608; Case Code (Imperial): 0603; Min Operating Temperature: -40°C; Max Operating Temperature: 105°C; Packaging: Tape and Reel; Package Quantity: 4000; Saturation Current: 75mA; Inductance: 15uH; Termination: SMD/SMT; Length: 1.6mm; Height: 0.031inch; Width: 0.8mm; ComponentLink1URL: https://datasheet.ciiva.com/1040/glfrseries-1040824.pdf?src-supplier=Digi-Key; ComponentLink1Description: https://datasheet.ciiva.com/1040/glfrseries-1040824.pdf?src-supplier=Digi-Key; ComponentLink2URL: https://datasheet.ciiva.com/1040/glfrseries-1040825.pdf?src-supplier=Digi-Key; ComponentLink2Description: https://datasheet.ciiva.com/1040/glfrseries-1040825.pdf?src-supplier=Digi-Key; ComponentLink3URL: https://datasheet.ciiva.com/1040/glfrseries-1040826.pdf?src-supplier=Digi-Key; ComponentLink3Description: https://datasheet.ciiva.com/1040/glfrseries-1040826.pdf?src-supplier=Digi-Key
footprint FB0201 (Chip Inductor, 2-Leads, Body 0.60x0.30mm, IPC High Density)
footprint FB0402 (Chip Inductor, 2-Leads, Body 1,00x0,50mm, IPC High Density)
footprint FB0603 (Chip Inductor, 2-Leads, Body 1,60x0,80mm, IPC High Density)
footprint RC1206 (Chip Resistor, 2-Leads, Body 3,10x1,60mm, IPC High Density)
pins: 1, 2

## LMK04610RTQR
designator U?  Supplier Part Number 1: 296-51339-1-ND
Manufacturer: Texas Instruments; Number of Inputs: 2; Number of Outputs: 10; Supplier 1: Digi-Key; Manufacturer Part Number: LMK04610RTQR; Stock 1: 2022; Pricing 1: 1 = 20,47000, 10 = 18,87700, 100 = 16,11940, 500 = 14,63474 (USD); RoHS: No; Min Operating Temperature: -40°C; Max Operating Temperature: 85°C
footprint LMK04610 (PQFN, 56-Leads, Body 8,00x8,00mm, Pitch 0,50mm, Thermal Pad 5,70x5,70mm, IPC High Density)
part A pins: 4 VDD_PLL2OSC, 6 VDD_PLL2CORE, 8 VDD_CORE, 20 VDDO_1/2, 25 VDDO_3/4, 28 VDDO_5, 31 VDD_IO, 37 VDD_OSC, 40 VDD_PLL1, 43 VDDO_6, 46 VDDO_7/8, 51 VDDO_9/10, 57 GND
part B pins: 5 PLL2_VCO_LDO_CAP, 7 PLL2_LDO_CAP, 29 CLKin1* (in), 30 CLKin1 (in), 32 CLKin0* (in), 33 CLKin0 (in), 34 CLKin_SEL (in), 38 OSCin* (in), 39 OSCin (in), 41 CTRL_VCXO, 42 PLL1_CAP
part C pins: 16 CLKout1 (out), 17 CLKout1* (out), 18 CLKout2 (out), 19 CLKout2* (out), 21 CLKout3 (out), 22 CLKout3* (out), 23 CLKout4 (out), 24 CLKout4* (out), 26 CLKout5 (out), 27 CLKout5* (out), 35 OSCout* (out), 36 OSCout (out), 44 CLKout6* (out), 45 CLKout6 (out), 47 CLKout7* (out), 48 CLKout7 (out), 49 CLKout8* (out), 50 CLKout8 (out), 52 CLKout9* (out), 53 CLKout9 (out), 54 CLKout10* (out), 55 CLKout10 (out)
part D pins: 1 NC, 2 NC, 3 NC, 9 STATUS0 (in), 10 STATUS1 (in), 11 SDIO (in), 12 SCS* (in), 13 SCL (in), 14 SYNC (in), 15 RESETN (in), 56 NC

## LP3878SD-ADJ/NOPB
designator U?
Low Dropout Regulators - LDO Micropower 800mA Low Noise Adj Vltg Reg; Manufacturer 1: Texas Instruments; Output Voltage: 5.5V; Dropout Voltage: 475mV; Min Input Voltage: 2.5V; Max Input Voltage: 16V; Number of Outputs: 1; Quiescent Current: 5.5mA; Polarity: Positive; Accuracy: 1%; Min Output Voltage: 1V; Output Type: Adjustable; Supplier 1: Digi-Key; Manufacturer Part Number 1: LP3878SD-ADJ/NOPB; Stock 1: 29951; Pricing 1: 1=2.14000, 10=1.92200, 100=1.54450, 500=1.26896 (USD); RoHS: Yes; Mount: Surface Mount; Number of Pins: 8; Contact Plating: Tin,Matte; Min Operating Temperature: -40°C; Max Operating Temperature: 125°C; Output Current: 800mA; Package Quantity: 1000; Max Output Current: 800mA; Packaging: Tape and Reel; Max Output Voltage: 5.5V; Output Voltage Accuracy: 1%; Number of Regulators: 1; Length: 4mm; Height: 0.8mm; Width: 4mm; Radiation Hardening: No; REACH SVHC: No SVHC; Lead Free: Lead Free; ComponentLink1URL: https://datasheet.ciiva.com/27052/1329588-27052012.pdf?src-supplier=Jameco; ComponentLink1Description: https://datasheet.ciiva.com/27052/1329588-27052012.pdf?src-supplier=Jameco; ComponentLink2URL: https://datasheet.ciiva.com/1571/1846896-1571038.pdf?src-supplier=Farnell; ComponentLink2Description: https://datasheet.ciiva.com/1571/1846896-1571038.pdf?src-supplier=Farnell; ComponentLink3URL: https://datasheet.ciiva.com/7992/1814893-7992723.pdf?src-supplier=Element14; ComponentLink3Description: https://datasheet.ciiva.com/7992/1814893-7992723.pdf?src-supplier=Element14; ComponentLink4URL: https://datasheet.ciiva.com/25626/0900766b810fa759-25626986.pdf?src-supplier=RSComponents; ComponentLink4Description: https://datasheet.ciiva.com/25626/0900766b810fa759-25626986.pdf?src-supplier=RSComponents; ComponentLink5URL: https://datasheet.ciiva.com/6595/lp3878-adj-6595783.pdf?src-supplier=Digi-Key; ComponentLink5Description: https://datasheet.ciiva.com/6595/lp3878-adj-6595783.pdf?src-supplier=Digi-Key; ComponentLink6URL: https://datasheet.ciiva.com/25974/lp3878-adj-25974985.pdf?src-supplier=Avnet+Europe; ComponentLink6Description: https://datasheet.ciiva.com/25974/lp3878-adj-25974985.pdf?src-supplier=Avnet+Europe; ComponentLink7URL: https://datasheet.ciiva.com/3223/lp3878-adj-3223946.pdf?src-supplier=Avnet; ComponentLink7Description: https://datasheet.ciiva.com/3223/lp3878-adj-3223946.pdf?src-supplier=Avnet; ComponentLink8URL: https://datasheet.ciiva.com/6595/lp3878-adj-6595786.pdf?src-supplier=Digi-Key; ComponentLink8Description: https://datasheet.ciiva.com/6595/lp3878-adj-6595786.pdf?src-supplier=Digi-Key; ComponentLink9URL: https://datasheet.ciiva.com/46419/lp3878-adj-46419375.pdf?src-supplier=Element14; ComponentLink9Description: https://datasheet.ciiva.com/46419/lp3878-adj-46419375.pdf?src-supplier=Element14; Supplier Part Number 1: LP3878SD-ADJ/NOPBCT-ND
footprint LP3878-ADJ (SDC08A)
pins: 1 BYPASS, 2 NC, 3 GND, 4 IN (in), 5 OUT (out), 6 ADJ  (in), 7 NC, 8 ~{SHUTDOWN} (in), 9 DAP

## LP5900SD-1.8/NOPB
designator U?
Ultra Low Noise, 150MA Linear Regulator For Rf/analog Circuits, 6 Pin Llp; Manufacturer 1: Texas Instruments; Output Voltage: 1.8V; Min Input Voltage: 2.5V; Max Input Voltage: 5.5V; Dropout Voltage: 150mV; Number of Outputs: 1; Polarity: Positive; Quiescent Current: 50uA; Output Voltage Accuracy: 2%; Output Type: Fixed; Supplier 1: Digi-Key; Manufacturer Part Number 1: LP5900SD-1.8/NOPB; Stock 1: 10846; Pricing 1: 1=0.77000, 10=0.68000, 100=0.52120, 500=0.41200 (USD); RoHS: Yes; Mount: Surface Mount; Number of Pins: 6; Min Operating Temperature: -40°C; Max Operating Temperature: 125°C; Output Current: 150mA; Package Quantity: 1000; Nominal Output Voltage: 1.8V; Packaging: Tape and Reel; Max Output Current: 150mA; Accuracy: 2%; Length: 2.2mm; Height: 0.8mm; Width: 2.5mm; Radiation Hardening: No; REACH SVHC: No SVHC; Lead Free: Lead Free; ComponentLink1URL: https://datasheet.ciiva.com/6598/lp5900-6598182.pdf?src-supplier=Digi-Key; ComponentLink1Description: https://datasheet.ciiva.com/6598/lp5900-6598182.pdf?src-supplier=Digi-Key; ComponentLink2URL: https://datasheet.ciiva.com/6598/lp5900-6598185.pdf?src-supplier=Digi-Key; ComponentLink2Description: https://datasheet.ciiva.com/6598/lp5900-6598185.pdf?src-supplier=Digi-Key; ComponentLink3URL: https://datasheet.ciiva.com/26175/lp5900-26175289.pdf?src-supplier=Avnet+Europe; ComponentLink3Description: https://datasheet.ciiva.com/26175/lp5900-26175289.pdf?src-supplier=Avnet+Europe; ComponentLink4URL: https://datasheet.ciiva.com/6598/lp5900-6598187.pdf?src-supplier=Digi-Key; ComponentLink4Description: https://datasheet.ciiva.com/6598/lp5900-6598187.pdf?src-supplier=Digi-Key; ComponentLink5URL: https://datasheet.ciiva.com/28643/1772310-28643116.pdf?src-supplier=Element14; ComponentLink5Description: https://datasheet.ciiva.com/28643/1772310-28643116.pdf?src-supplier=Element14; ComponentLink6URL: https://datasheet.ciiva.com/14278/lp5900-14278125.pdf?src-supplier=Avnet; ComponentLink6Description: https://datasheet.ciiva.com/14278/lp5900-14278125.pdf?src-supplier=Avnet; ComponentLink7URL: https://datasheet.ciiva.com/22678/1772310-22678013.pdf?src-supplier=Element14; ComponentLink7Description: https://datasheet.ciiva.com/22678/1772310-22678013.pdf?src-supplier=Element14; Supplier Part Number 1: LP5900SD-1.8/NOPBCT-ND
footprint LP5900 (PSON, 6-Leads, Body 2.10x2.50mm, Pitch 0.65mm, Thermal Pad 1.20x0.75mm, IPC High Density)
pins: 1 OUT, 2 NC, 3 GND, 4 EN, 5 NC, 6 VIN, 7 EP

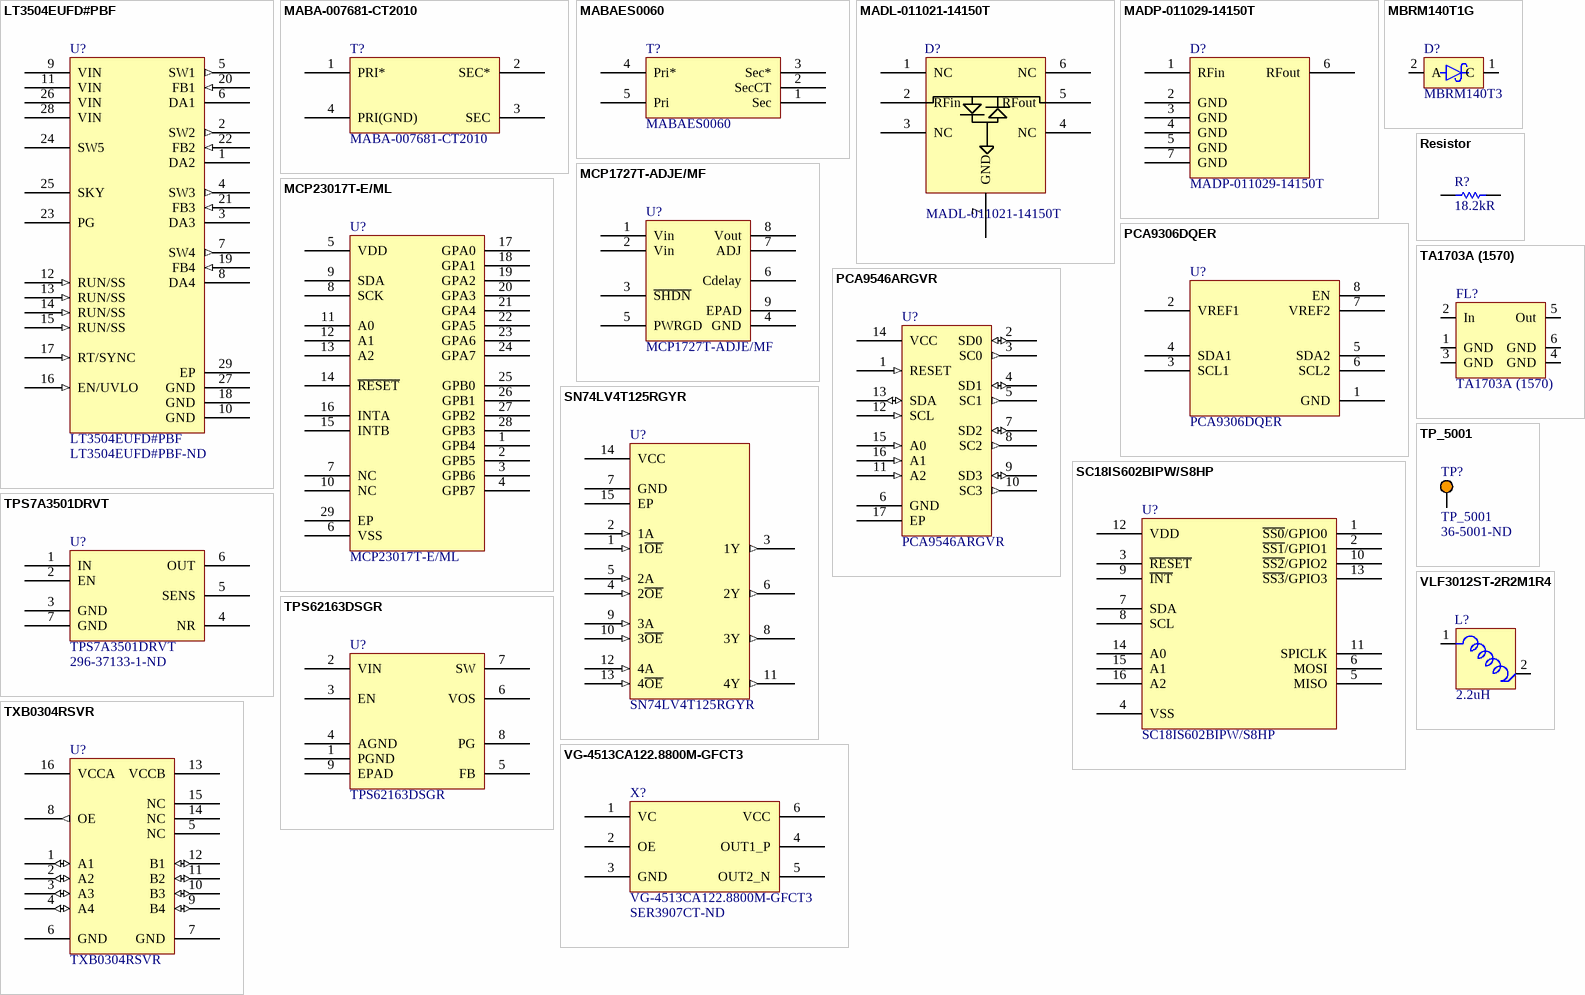
[diagram p1: symbols LT3504EUFD#PBF to VLF3012ST-2R2M1R4]

## LT3504EUFD#PBF
designator U?  Supplier Part Number 1: LT3504EUFD#PBF-ND
LINEAR TECHNOLOGY         LT3504EUFD#PBF             BUCK, QUAD, 3.2/40V, 1A, 2.2MHZ, 28QFN; Manufacturer: Analog Devices / Linear Technology; Output Voltage: 40V; Min Input Voltage: 3.2V; Number of Outputs: 4; Switching Frequency: 2.1MHz; Synchronous Rectifier: No; Output Type: Adjustable; Supplier 1: Digi-Key; Manufacturer Part Number: LT3504EUFD#PBF; Stock 1: 1751; Pricing 1: 1 = 8,49000, 25 = 5,63840, 100 = 4,66200, 250 = 4,42892, 500 = 4,32900 (USD); RoHS: Yes; Case/Package: QFN; Number of Pins: 28; Min Operating Temperature: -40°C; Max Operating Temperature: 125°C; Package Quantity: 73; Packaging: Rail/Tube; Output Current: 1A; Current - Output 1: 1A; Current - Output 2: 1A; Voltage - Output 1: 40V; Voltage - Output 2: 40V; REACH SVHC: No SVHC; Lead Free: Lead Free; ComponentLink1URL: https://datasheet.ciiva.com/6192/1732075-6192640.pdf?src-supplier=Farnell; ComponentLink1Description: https://datasheet.ciiva.com/6192/1732075-6192640.pdf?src-supplier=Farnell; ComponentLink2URL: https://datasheet.ciiva.com/7363/1732075-7363817.pdf?src-supplier=Newark; ComponentLink2Description: https://datasheet.ciiva.com/7363/1732075-7363817.pdf?src-supplier=Newark
footprint LT3504 (UFD Package  28-Lead Plastic QFN (4mm × 5mm)  (Reference LTC DWG # 05-08-1712 Rev B))
pins: 1 DA2, 2 SW2 (out), 3 DA3, 4 SW3 (out), 5 SW1 (out), 6 DA1, 7 SW4 (out), 8 DA4, 9 VIN, 10 GND, 11 VIN, 12 RUN/SS (in), 13 RUN/SS (in), 14 RUN/SS (in), 15 RUN/SS (in), 16 EN/UVLO (in), 17 RT/SYNC (in), 18 GND, 19 FB4 (in), 20 FB1 (in), 21 FB3 (in), 22 FB2 (in), 23 PG (oc), 24 SW5, 25 SKY, 26 VIN, 27 GND, 28 VIN, 29 EP

## MABA-007681-CT2010
designator T?
RF Transformer 1.414: 1 4Term. SMD; Manufacturer: TE Connectivity MA-COM; Current Rating: 600mA; Power Rating: 250mW; Supplier 1: Digi-Key; Manufacturer Part Number: MABA-007681-CT2010; Stock 1: 1606; Pricing 1: 1 = 2,84000, 10 = 2,27000, 25 = 1,84480, 50 = 1,79740, 100 = 1,75010, 250 = 1,70280 (USD); RoHS: Yes; Mount: Surface Mount; Case/Package: SMD/SMT; Number of Pins: 4; Min Operating Temperature: -40°C; Max Operating Temperature: 85°C; Packaging: Tape and Reel; Package Quantity: 900; Turns Ratio: 1.414:1; Termination: SMD/SMT; Max DC Current: 600mA; Length: 7.11mm; Height: 3.33mm; Width: 6.35mm; Depth: 6.35mm; Radiation Hardening: No; ComponentLink1URL: https://datasheet.ciiva.com/29655/maba-007681-ct2010-29655680.pdf?src-supplier=Digi-Key; ComponentLink1Description: https://datasheet.ciiva.com/29655/maba-007681-ct2010-29655680.pdf?src-supplier=Digi-Key; ComponentLink2URL: https://datasheet.ciiva.com/15154/getdatasheetpartid-721834-15154840.pdf?src-supplier=Verical; ComponentLink2Description: https://datasheet.ciiva.com/15154/getdatasheetpartid-721834-15154840.pdf?src-supplier=Verical; ComponentLink3URL: https://datasheet.ciiva.com/3296/maba-007681-ct2010-3296009.pdf?src-supplier=Avnet; ComponentLink3Description: https://datasheet.ciiva.com/3296/maba-007681-ct2010-3296009.pdf?src-supplier=Avnet; Supplier Part Number 1: 1465-1304-1-ND
footprint MABA-007681-CT2010
pins: 1 PRI*, 2 SEC*, 3 SEC, 4 PRI(GND)

## MABAES0060
designator T?
RF Transformer 1: 1CT 0.3MHz to 200MHz Surface Mount; Manufacturer 1: TE Connectivity MA-COM; Power Rating: 500mW; Turns Ratio: 1:1; Max DC Current: 500mA; Insertion Loss: 1.5dB; Lead/Base Style: Gull Wing; Supplier 1: Digi-Key; Manufacturer Part Number 1: MABAES0060; Stock 1: 4134; Pricing 1: 1=2.44000, 10=1.95400, 25=1.58720, 50=1.54660, 100=1.50590, 250=1.46520, 500=1.45300, 1000=1.28612 (USD); RoHS: Yes; Mount: Surface Mount; Case/Package: SMD/SMT; Number of Pins: 5; Min Operating Temperature: -40°C; Max Operating Temperature: 85°C; Packaging: Tape and Reel; Package Quantity: 2000; Termination: SMD/SMT; Length: 3.81mm; Height: 2.67mm; Width: 3.81mm; Depth: 3.81mm; Radiation Hardening: No; Lead Free: Lead Free; ComponentLink1URL: https://datasheet.ciiva.com/3295/ds-mabaes0060-v5-3295936.pdf?src-supplier=Avnet; ComponentLink1Description: https://datasheet.ciiva.com/3295/ds-mabaes0060-v5-3295936.pdf?src-supplier=Avnet; ComponentLink2URL: https://datasheet.ciiva.com/29655/mabaes0060-v6-29655622.pdf?src-supplier=Digi-Key; ComponentLink2Description: https://datasheet.ciiva.com/29655/mabaes0060-v6-29655622.pdf?src-supplier=Digi-Key; ComponentLink3URL: https://datasheet.ciiva.com/4550/ds-mabaes0060-v5-14473-4550847.pdf?src-supplier=Mouser; ComponentLink3Description: https://datasheet.ciiva.com/4550/ds-mabaes0060-v5-14473-4550847.pdf?src-supplier=Mouser; ComponentLink4URL: https://datasheet.ciiva.com/29655/mabaes0060-v6-29655623.pdf?src-supplier=Digi-Key; ComponentLink4Description: https://datasheet.ciiva.com/29655/mabaes0060-v6-29655623.pdf?src-supplier=Digi-Key; ComponentLink5URL: https://datasheet.ciiva.com/29655/mabaes0060-v6-29655624.pdf?src-supplier=Digi-Key; ComponentLink5Description: https://datasheet.ciiva.com/29655/mabaes0060-v6-29655624.pdf?src-supplier=Digi-Key; Supplier Part Number 1: 1465-1317-1-ND
footprint MABAES0060 (SOTFL, 5-Leads, Body 3.81x2.81mm, Pitch 1.27mm, IPC High Density)
pins: 1 Sec, 2 SecCT, 3 Sec*, 4 Pri*, 5 Pri

## MADL-011021-14150T
designator D?
DIODE SCHOTTKY/LIMITER 6TDFN; Manufacturer: TE Connectivity MA-COM; Supplier 1: Digi-Key; Manufacturer Part Number: MADL-011021-14150T; Stock 1: 7736; Pricing 1: 1 = 2,43000, 10 = 2,18400, 25 = 2,06000, 100 = 1,75510, 250 = 1,64800, 500 = 1,44200, 1000 = 1,19480 (USD); RoHS: Yes; Packaging: Tape and Reel; ComponentLink1URL: http://cdn.macom.com//datasheets/MADL-011021-14150T.pdf?src-supplier=Digi-Key; ComponentLink1Description: http://cdn.macom.com//datasheets/MADL-011021-14150T.pdf?src-supplier=Digi-Key; Supplier Part Number 1: 1465-1736-1-ND
footprint MADP-011029-14150 (PSON, 6-Leads, Body 1,20x1,50mm, Pitch 0,40mm, Thermal Pad 0,85x0,47mm, IPC High Density)
pins: 1 NC, 2 RFin, 3 NC, 4 NC, 5 RFout, 6 NC, 7 GND

## MADP-011029-14150T
designator D?
PIN Diodes .5-12GHz Ls=.4nH 100W Pk; Manufacturer: TE Connectivity MA-COM; Forward Voltage: 900mV; Forward Current: 250mA; Reverse Voltage (DC): 400V; Max Power Dissipation: 7.5W; Element Configuration: Single; Diode Type: PIN - Single; Supplier 1: Digi-Key; Manufacturer Part Number: MADP-011029-14150T; Stock 1: 6865; Pricing 1: 1 = 2,89000, 10 = 2,59800, 25 = 2,45640, 100 = 2,12900, 250 = 2,01984, 500 = 1,81238, 1000 = 1,52852 (USD); RoHS: Yes; Case/Package: DFN; Weight: 0.000744oz; Min Operating Temperature: -65°C; Max Operating Temperature: 125°C; Packaging: Tape and Reel; Package Quantity: 3000; Termination: Solder; Max Current Rating: 250mA; ComponentLink1URL: https://datasheet.ciiva.com/24021/madp-011029-14150t-257701-24021442.pdf?src-supplier=Mouser; ComponentLink1Description: https://datasheet.ciiva.com/24021/madp-011029-14150t-257701-24021442.pdf?src-supplier=Mouser; Supplier Part Number 1: 1465-1738-1-ND
footprint MADP-011029-14150 (PSON, 6-Leads, Body 1,20x1,50mm, Pitch 0,40mm, Thermal Pad 0,85x0,47mm, IPC High Density)
pins: 1 RFin, 2 GND, 3 GND, 4 GND, 5 GND, 6 RFout, 7 GND

## MBRM140T1G
designator D?, comment MBRM140T3
Supplier Part Number 1: MBRM140T3GOSCT-ND; Supplier 1: Digi-Key
footprint CASE 457 (CASE 457-04, MBRM140T1G)
pins: 1 C, 2 A

## MCP1727T-ADJE/MF
designator U?
IC REG LDO ADJ 1.5A 8DFN; Manufacturer 1: Microchip; Number of Outputs: 1; Min Input Voltage: 2.3V; Max Input Voltage: 6V; Output Voltage: 5V; Dropout Voltage: 330mV; Input Bias Current: 120uA; Reference Voltage: 410mV; Polarity: Positive; Accuracy: 0.5%; Output Type: Adjustable; Supplier 1: Digi-Key; Manufacturer Part Number 1: MCP1727T-ADJE/MF; Stock 1: 9419; Pricing 1: 1=0.84000, 25=0.71080, 100=0.63860 (USD); RoHS: Yes; Mount: Surface Mount; Case/Package: DFN; Contact Plating: Tin,Matte; Min Operating Temperature: -40°C; Max Operating Temperature: 125°C; Package Quantity: 3300; Output Current: 1.5A; Packaging: Tape and Reel; Max Output Current: 1.5A; Quiescent Current: 120uA; Radiation Hardening: No; Lead Free: Lead Free; ComponentLink1URL: https://datasheet.ciiva.com/2057/21999b-2057048.pdf?src-supplier=Digi-Key; ComponentLink1Description: https://datasheet.ciiva.com/2057/21999b-2057048.pdf?src-supplier=Digi-Key; ComponentLink2URL: https://datasheet.ciiva.com/8237/jp027822-8237704.pdf?src-supplier=Avnet; ComponentLink2Description: https://datasheet.ciiva.com/8237/jp027822-8237704.pdf?src-supplier=Avnet; ComponentLink3URL: https://datasheet.ciiva.com/17364/jp027822-17364137.pdf?src-supplier=Avnet+Europe; ComponentLink3Description: https://datasheet.ciiva.com/17364/jp027822-17364137.pdf?src-supplier=Avnet+Europe; Supplier Part Number 1: MCP1727T-ADJE/MFCT-ND
footprint MCP1727T-ADJE/MF (SON, 8-Leads, Body 3.00x3.00mm, Pitch 0.65mm, Thermal Pad 2.40x1.60mm, IPC High Density)
pins: 1 Vin, 2 Vin, 3 ~{SHDN}, 4 GND, 5 PWRGD, 6 Cdelay, 7 ADJ, 8 Vout, 9 EPAD

## MCP23017T-E/ML
designator U?
IC I/O EXPANDER I2C 16B 28QFN; Manufacturer: Microchip; Output Current: 25mA; Interface: I2C,Serial; Operating Supply Voltage: 5.5V; Number of I/Os: 16; Power Dissipation: 700mW; Max Frequency: 1.7MHz; Supplier 1: Digi-Key; Manufacturer Part Number: MCP23017T-E/ML; Stock 1: 7016; Pricing 1: 1 = 1,45000, 25 = 1,21560, 100 = 1,10210 (USD); RoHS: Yes; Case/Package: QFN; Contact Plating: Tin,Matte; Min Operating Temperature: -40°C; Max Operating Temperature: 125°C; Package Quantity: 1600; Packaging: Tape and Reel; Frequency: 1.7MHz; Number of Bits: 16; Lead Free: Lead Free; ComponentLink1URL: https://datasheet.ciiva.com/1780/21952b-1780757.pdf?src-supplier=Digi-Key; ComponentLink1Description: https://datasheet.ciiva.com/1780/21952b-1780757.pdf?src-supplier=Digi-Key; ComponentLink2URL: https://datasheet.ciiva.com/16454/filehandler-aspxddocname-en023709-16454263.pdf?src-supplier=Future+Electronics; ComponentLink2Description: https://datasheet.ciiva.com/16454/filehandler-aspxddocname-en023709-16454263.pdf?src-supplier=Future+Electronics; ComponentLink3URL: https://datasheet.ciiva.com/8128/21952b-8128584.pdf?src-supplier=Avnet; ComponentLink3Description: https://datasheet.ciiva.com/8128/21952b-8128584.pdf?src-supplier=Avnet; Supplier Part Number 1: MCP23017T-E/MLCT-ND
footprint MCP23017/MCP23S17 (QFN, 28-Leads, Body 6,00x6,00mm, Pitch 0,65mm, Thermal Pad 4,25x4,25mm, IPC High Density)
pins: 1 GPB4, 2 GPB5, 3 GPB6, 4 GPB7, 5 VDD, 6 VSS, 7 NC, 8 SCK, 9 SDA, 10 NC, 11 A0, 12 A1, 13 A2, 14 ~{RESET}, 15 INTB, 16 INTA, 17 GPA0, 18 GPA1, 19 GPA2, 20 GPA3, 21 GPA4, 22 GPA5, 23 GPA6, 24 GPA7, 25 GPB0, 26 GPB1, 27 GPB2, 28 GPB3, 29 EP